# Altium footprint library LM2596SXADJ.PcbLib: 1 footprints
Each footprint in its own frame and in the unit in brackets; x right, y up, seen from the top. Pads: shape width x height; smd on the part's side, far side on the other; paste and mask are expansions set on the pad; w line width, h text height; cw(c..) or ccw(c..) is an arc to the next point about the centre after c.
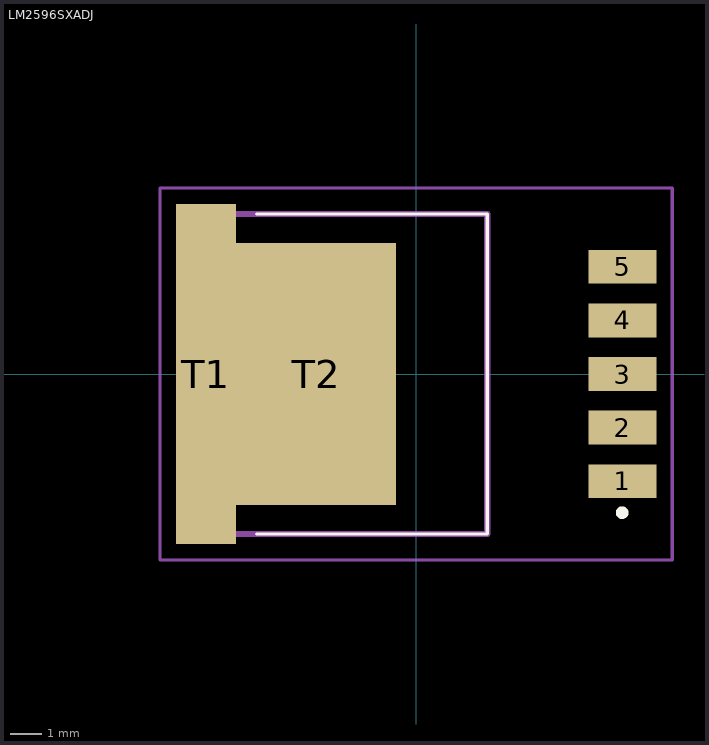
[diagram p0: the footprint, top view; thin cyan lines are the x and y axes]

## LM2596SXADJ [mm]
pads (7):
  rect 2.16x1.07 smd: 1(6.545,-3.4) 2(6.545,-1.7) 3(6.545,0) 4(6.545,1.7) 5(6.545,3.4)
  rect 1.91x10.8 smd: T1(-6.67,0)
  rect 5.08x8.33 smd: T2(-3.175,0)
Top Overlay:
  lines w0.1: -5.063,-5.08 2.258,-5.08 2.258,5.08 -5.063,5.08
  lines w0.2: 6.436,-4.4 cw(c6.538,-4.4) 6.639,-4.4 cw(c6.538,-4.4) 6.436,-4.4
Mechanical 15:
  lines w0.2: -6.383,-5.08 -6.383,5.08 2.258,5.08 2.258,-5.08 -6.383,-5.08
Mechanical 20:
  lines w0.1: -8.125,-5.9 -8.125,5.9 8.125,5.9 8.125,-5.9 -8.125,-5.9